# Altium schematic symbol library INA219AID.SchLib: 1 symbol
Pins are listed as number, name and electrical type; pins without a type are passive.

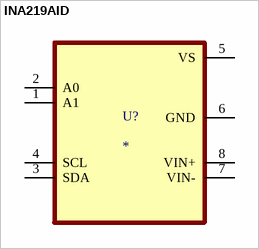
[diagram p0: symbol INA219AID]

## INA219AID
designator U?
26-V 12-bit I2C output digital power monitor; MF: Texas Instruments; MP: INA219AID; SnapEDA_Link: https://www.snapeda.com/parts/INA219AID/Texas+Instruments/view-part/?ref=snap; Package: SOIC-8 Texas Instruments; Value: *; Check_prices: https://www.snapeda.com/parts/INA219AID/Texas+Instruments/view-part/?ref=eda
footprint SOIC127P599X175-8N
pins: 1 A1, 2 A0, 3 SDA, 4 SCL, 5 VS (power), 6 GND (power), 7 VIN-, 8 VIN+